# Altium schematic symbol library UCP.SchLib: 378 symbols (part 7 of 14)
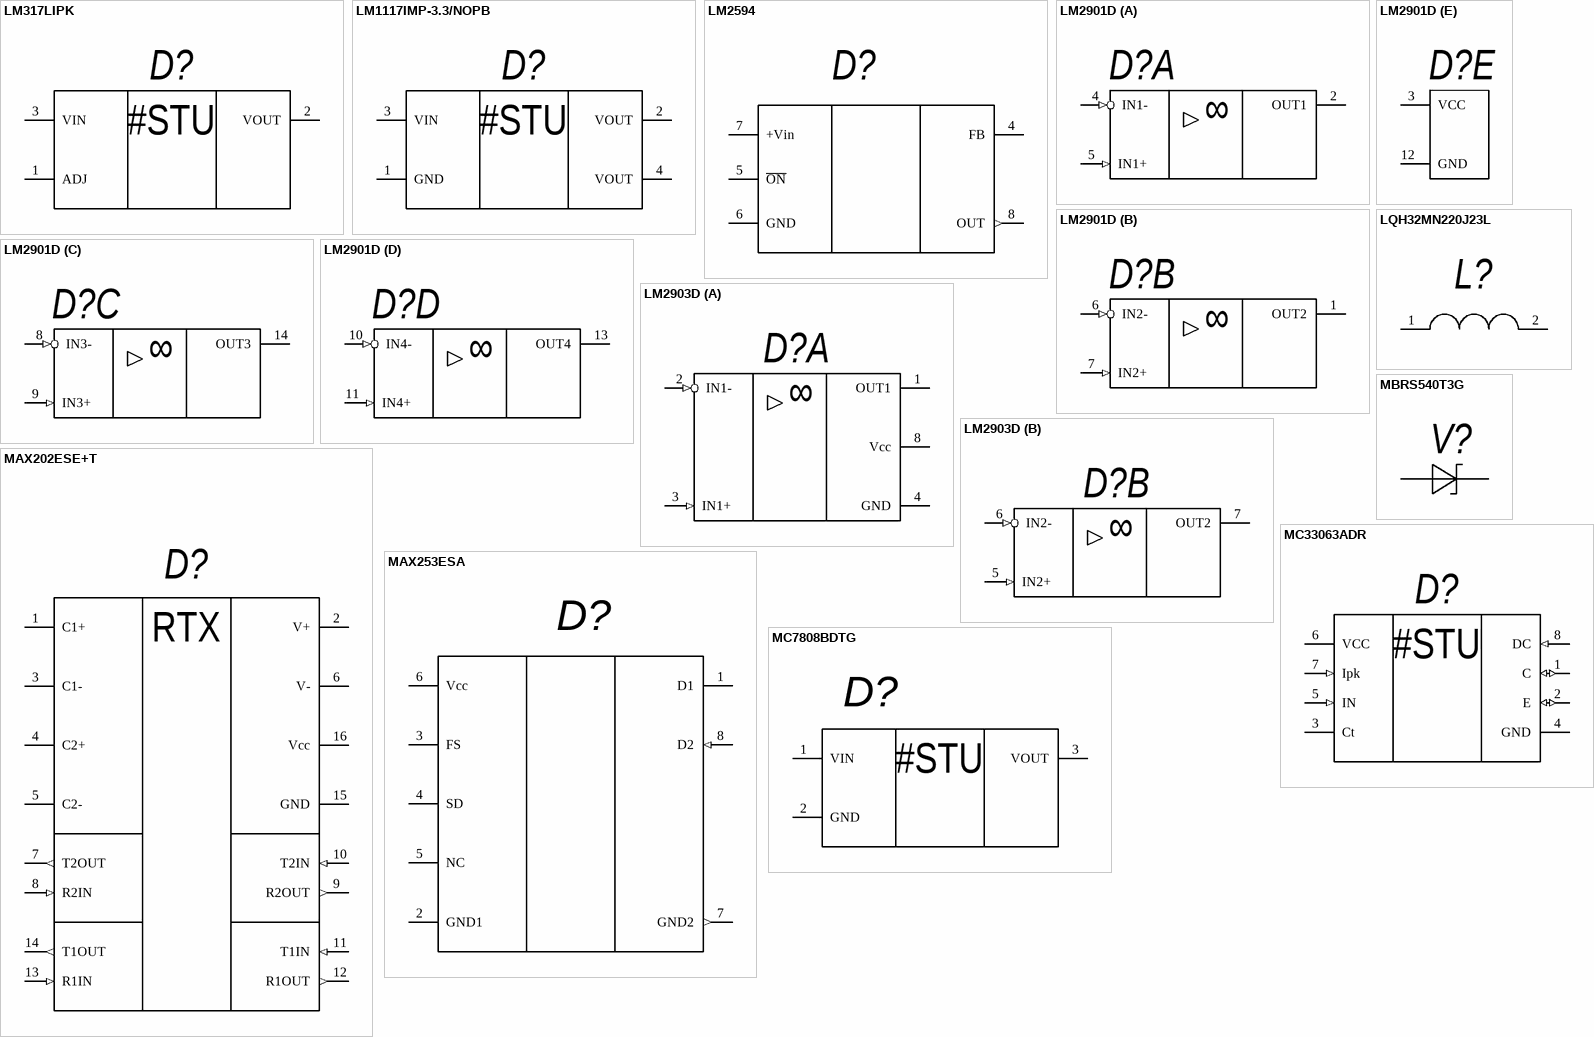
[diagram p30: symbols LM317LIPK to MC33063ADR]

## MC33063ADR
designator D?  (value not drawn)
1.5-A Peak Boost/Buck/Inverting Switching Regulators; Type: Микросхема; Supplier 1: Digi-Key; Supplier Part Number 1: 296-17763-1-ND; Case/Package: SOIC-8-150; Mount: SMT; Value: MC33063
footprint SOIC8P127_490X600X175L83X42N (Small Outline IC (SOIC), 1.27 mm pitch; 8 pin, 4.905 mm L X 3.90 mm W X 1.75 mm H body)
footprint SOIC8P127_490X600X175L65X42N (Small Outline IC (SOIC), 1.27 mm pitch; 8 pin, 4.905 mm L X 3.90 mm W X 1.75 mm H body)
pins: 1 C (io) "Коллектор ключа", 2 E (io) "Эмиттер ключа", 3 Ct "Времязадающий конденсатор", 4 GND (power), 5 IN (in) "Инвертирующий вход компаратора", 6 VCC (power) "Vcc", 7 Ipk (in) "Вход датчика тока", 8 DC (in) "Коллектор транзистора Дарлингтона"
text: #STU

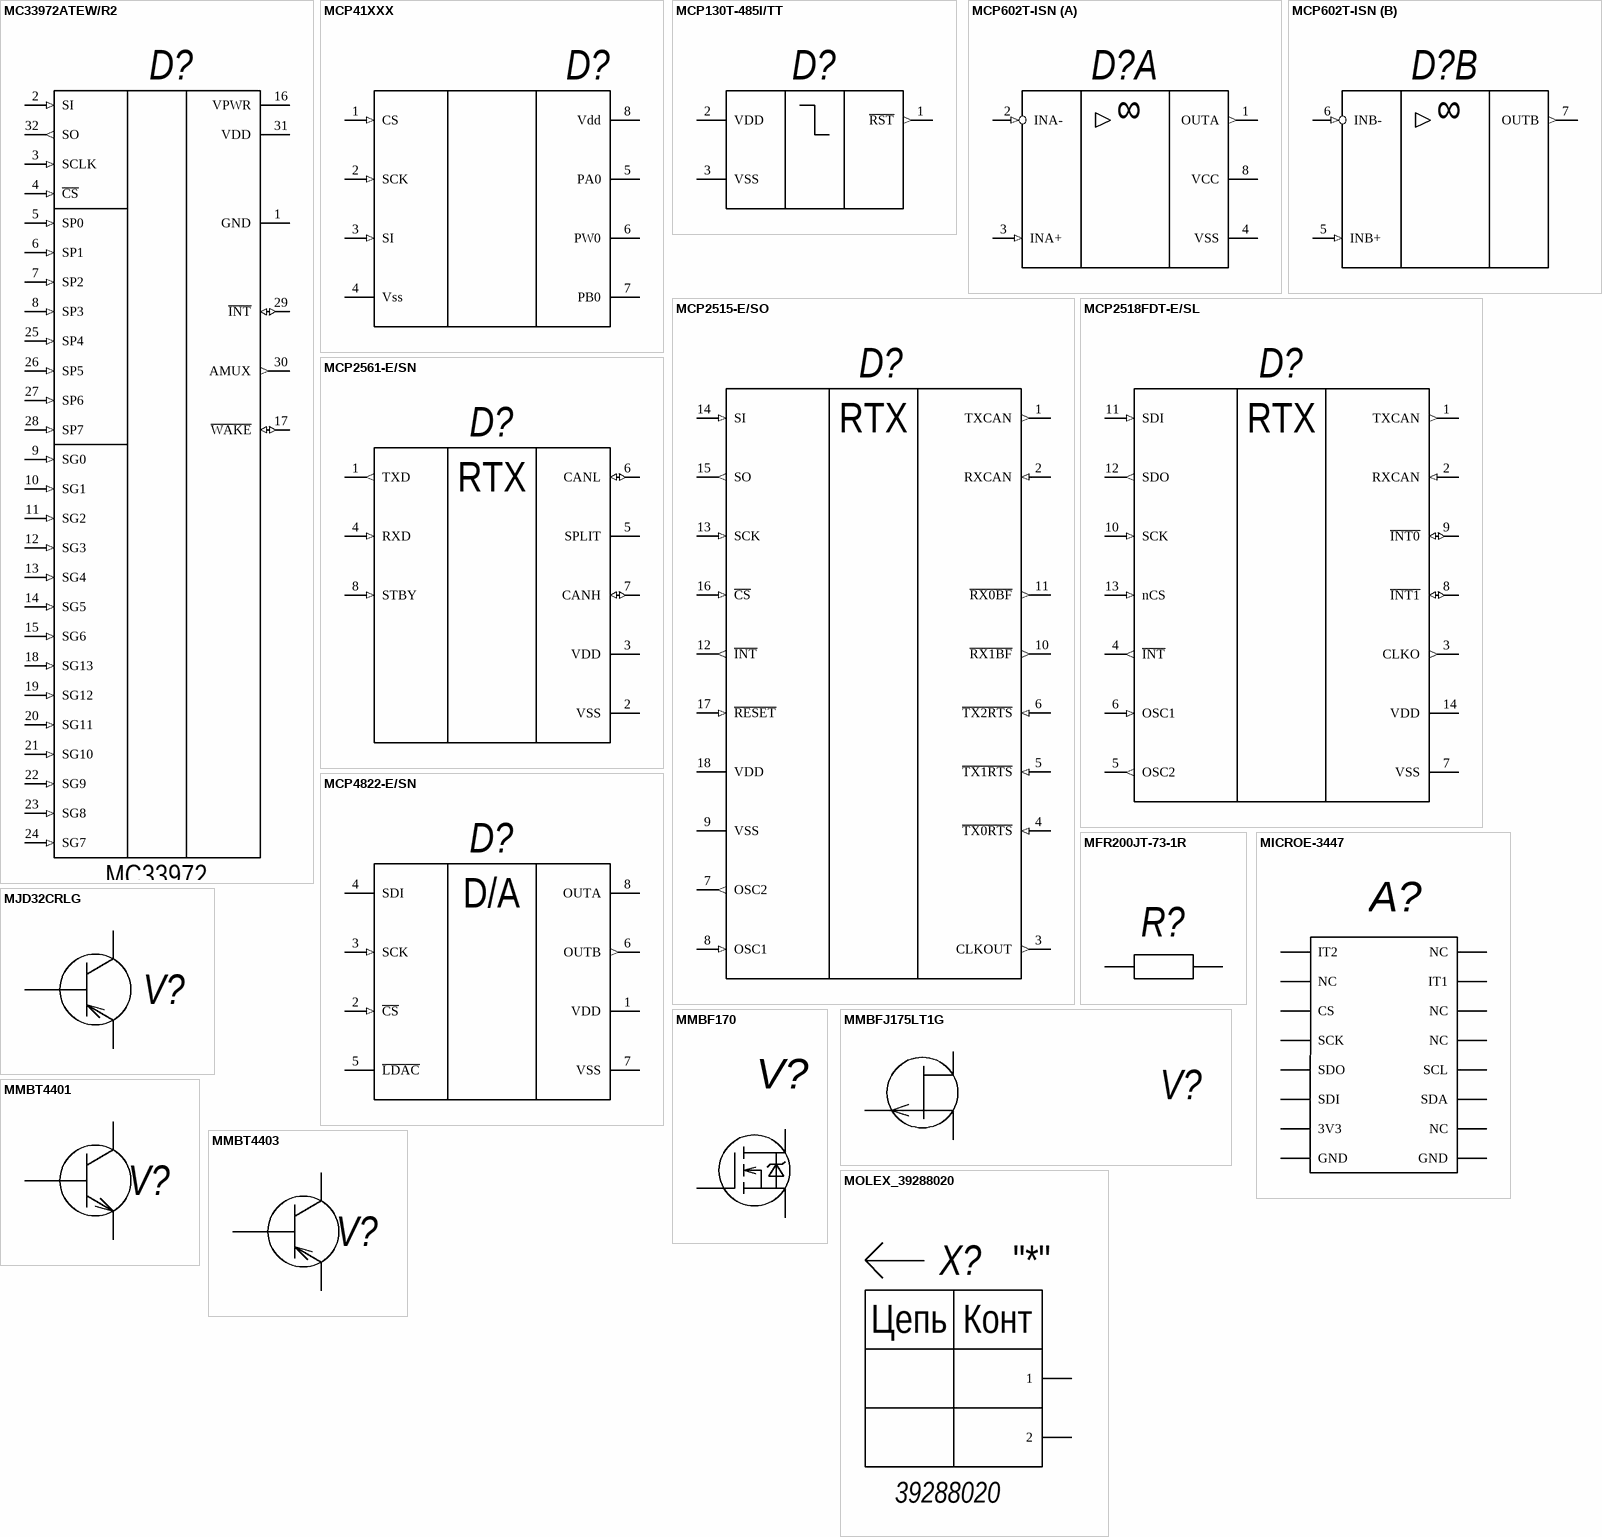
[diagram p16: symbols MC33972ATEW/R2 to MOLEX_39288020]

## MC33972ATEW/R2
designator D?  value MC33972  (hidden comment: MC33972ATEW/R2)
Multiple Switch Detection Interface with Suppressed Wake-Up Automotive 32-Pin SOIC W T/R; Manufacturer 1: NXP Freescale; Manufacturer Part Number 1: MC33972ATEWR2; Interface: SPI,Serial; Nominal Supply Current: 2mA; Operating Supply Voltage: 26V; Type: Микросхема; RoHS 1: Yes; Category: Interface ICs; Stock 1: 1020; Pricing 1: 1=5,83830, 10=5,24550, 25=4,95890, 100=4,29770, 250=4,07730, 500=3,65850, 1000=3,48430 (USD); Mount: SMT; Case/Package: SOP-32; Number of Pins: 32; Weight: 0.01799oz; Contact Plating: Tin,Matte; Min Operating Temperature: -40°C; Max Operating Temperature: 125°C; Packaging: Tape and Reel; Package Quantity: 1000; Series: -; Supply Current: 2mA; Radiation Hardening: No; Lead Free: Lead Free; Halogen Free: Halogen Free; RoHS Compliant: Yes; ComponentLink1URL: https://datasheet.ciiva.com/15134/getdatasheetpartid-342878-15134783.pdf?src-supplier=Verical; ComponentLink1Description: https://datasheet.ciiva.com/15134/getdatasheetpartid-342878-15134783.pdf?src-supplier=Verical; ComponentLink2URL: https://datasheet.ciiva.com/8128/mc33972-8128875.pdf?src-supplier=Avnet; ComponentLink2Description: https://datasheet.ciiva.com/8128/mc33972-8128875.pdf?src-supplier=Avnet; ComponentLink3URL: https://datasheet.ciiva.com/16446/mc33972-16446155.pdf?src-supplier=Future+Electronics; ComponentLink3Description: https://datasheet.ciiva.com/16446/mc33972-16446155.pdf?src-supplier=Future+Electronics; ComponentLink4URL: https://datasheet.ciiva.com/6632/mc33972-6632319.pdf?src-supplier=Digi-Key; ComponentLink4Description: https://datasheet.ciiva.com/6632/mc33972-6632319.pdf?src-supplier=Digi-Key; Supplier 1: Arrow Electronics; Supplier Part Number 1: MC33972ATEWR2; Supplier 2: Farnell; Supplier Part Number 2: 2776211
footprint SOP32P65_1100X1030X265L70X30 (Small Outline Pkg (SOP), 0.65 mm pitch; 32 pin, 11.00 mm L X 7.50 mm W X 2.65 mm H body)
pins: 1 GND (power) "Ground", 2 SI (in) "SPI control data input pin from the MCU to the 33972", 3 SCLK (in) "SPI control clock input pin", 4 ~{CS} (in) "SPI control chip select input pin from the MCU to the 33972. Logic [0} allows data to be transferred in", 5 SP0 (in) "Programmable switch-to-battery or switch-to-ground input pins.", 6 SP1 (in) "Programmable switch-to-battery or switch-to-ground input pins.", 7 SP2 (in) "Programmable switch-to-battery or switch-to-ground input pins.", 8 SP3 (in) "Programmable switch-to-battery or switch-to-ground input pins.", 9 SG0 (in) "Switch-to-ground input pins", 10 SG1 (in) "Switch-to-ground input pins", 11 SG2 (in) "Switch-to-ground input pins", 12 SG3 (in) "Switch-to-ground input pins", 13 SG4 (in) "Switch-to-ground input pins", 14 SG5 (in) "Switch-to-ground input pins", 15 SG6 (in) "Switch-to-ground input pins", 16 VPWR (power) "Battery supply input pin. Pin requires external reverse battery protection.", 17 ~{WAKE} (io) "Open drain wake-up output. Designed to control a power supply enable pin.", 18 SG13 (in) "Switch-to-ground input pins", 19 SG12 (in) "Switch-to-ground input pins", 20 SG11 (in) "Switch-to-ground input pins", 21 SG10 (in) "Switch-to-ground input pins", 22 SG9 (in) "Switch-to-ground input pins", 23 SG8 (in) "Switch-to-ground input pins", 24 SG7 (in) "Switch-to-ground input pins", 25 SP4 (in) "Programmable switch-to-battery or switch-to-ground input pins.", 26 SP5 (in) "Programmable switch-to-battery or switch-to-ground input pins.", 27 SP6 (in) "Programmable switch-to-battery or switch-to-ground input pins.", 28 SP7 (in) "Programmable switch-to-battery or switch-to-ground input pins.", 29 ~{INT} (io) "Open-drain output to MCU. Used to indicate an input switch change of state.", 30 AMUX (out) "Analog multiplex output", 31 VDD (power) "3.3 / 5.0 V supply. Sets SPI communication level for the SO driver.", 32 SO (out) "Provides digital data from the 33972 to the MCU"

## MCP41XXX
designator D?  (value not drawn)
Single/Dual Digital Potentiometer with SPI™ Interface; Type: Микросхема; Value: MCP41; Supplier 1: Digi-Key; Supplier Part Number 1: MCP41010-I/SN-ND; Case/Package: SOIC-8-150; Mount: SMT
footprint SOIC8P127_490X600X175L65X42N (Small Outline IC (SOIC), 1.27 mm pitch; 8 pin, 4.905 mm L X 3.90 mm W X 1.75 mm H body)
footprint SOIC8P127_490X600X175L65X42N (Small Outline IC (SOIC), 1.27 mm pitch; 8 pin, 4.905 mm L X 3.90 mm W X 1.75 mm H body)
pins: 1 CS (in) "Serial Data Input", 2 SCK (in) "Serial Clock Input", 3 SI (in) "Chip Select Input", 4 Vss (power) "Synchronization Input.  This pin is used to transfer DAC settings (Input Registers) to the output registers (VOUT)", 5 PA0 "Ground reference point for all circuitry on the device", 6 PW0 "Supply Voltage Input (2.7V to 5.5V)", 7 PB0 "DACB Output", 8 Vdd (power) "DACA Output"

## MCP130T-485I/TT
designator D?  (value not drawn)
Power Supply Support Circuit, Fixed, 1 Channel, +4.73V, CMOS, PDSO3; Manufacturer 1: Microchip; Max Supply Voltage: 5.5V; Min Supply Voltage: 1V; Type: Микросхема; Nominal Supply Current: 60uA; Number of Voltages Monitored: 1; Reset: Active Low; Reset Timeout: 150ms; Threshold Voltage: 4.725V; Overvoltage Threshold: 4.85V; Undervoltage Threshold: 4.6V; Watchdog Timer: No; Quiescent Current: 45uA; Value: MCP130; Supplier 1: Digi-Key; Manufacturer Part Number 1: MCP130T-485I/TT; RoHS: Yes; Category: Voltage Supervisors; Stock 1: 334; Pricing 1: 1=0,55000, 25=0,45600, 100=0,42400 (USD); Mount: SMT; Case/Package: SOT-23-3; Number of Pins: 3; Min Operating Temperature: -40°C; Max Operating Temperature: 85°C; Packaging: Tape and Reel; Package Quantity: 3000; Operating Supply Current: 60uA; Max Supply Current: 60uA; Number of Elements: 1; Min Reset Threshold Voltage: 4.6V; Max Reset Threshold Voltage: 4.85V; Supply Current: 60uA; Length: 3.04mm; Width: 1.4mm; Height: 1.02mm; Radiation Hardening: No; REACH SVHC: No SVHC; Lead Free: Lead Free; RoHS Compliant: Yes; ComponentLink1URL: https://datasheet.ciiva.com/1969/11184d-1969586.pdf?src-supplier=Digi-Key; ComponentLink1Description: https://datasheet.ciiva.com/1969/11184d-1969586.pdf?src-supplier=Digi-Key; ComponentLink2URL: https://datasheet.ciiva.com/1969/11184d-1969587.pdf?src-supplier=Digi-Key; ComponentLink2Description: https://datasheet.ciiva.com/1969/11184d-1969587.pdf?src-supplier=Digi-Key; ComponentLink3URL: https://datasheet.ciiva.com/1969/11184d-1969588.pdf?src-supplier=Digi-Key; ComponentLink3Description: https://datasheet.ciiva.com/1969/11184d-1969588.pdf?src-supplier=Digi-Key; ComponentLink4URL: https://datasheet.ciiva.com/8140/11184d-8140437.pdf?src-supplier=Avnet; ComponentLink4Description: https://datasheet.ciiva.com/8140/11184d-8140437.pdf?src-supplier=Avnet; ComponentLink5URL: https://datasheet.ciiva.com/5696/11184d-5696166.pdf?src-supplier=Farnell; ComponentLink5Description: https://datasheet.ciiva.com/5696/11184d-5696166.pdf?src-supplier=Farnell; ComponentLink6URL: https://datasheet.ciiva.com/7990/11603-7990633.pdf?src-supplier=Element14; ComponentLink6Description: https://datasheet.ciiva.com/7990/11603-7990633.pdf?src-supplier=Element14; ComponentLink7URL: https://datasheet.ciiva.com/16357/11184d-16357833.pdf?src-supplier=Future+Electronics; ComponentLink7Description: https://datasheet.ciiva.com/16357/11184d-16357833.pdf?src-supplier=Future+Electronics; Supplier Part Number 1: MCP130T-485I/TTCT-ND
footprint SOT23-3P95_240X110L25X60N (Small Outline Transistor (SOT23), 0.95 mm pitch; 3 pin, 2.90 mm L X 1.30 mm W X 1.10 mm H body)
footprint SOT23-3P95_240X110L30X43N (Small Outline Transistor (SOT23), 0.95 mm pitch; 3 pin, 2.90 mm L X 1.30 mm W X 1.10 mm H body)
pins: 1 ~{RST} (out) "Назначение вывода", 2 VDD (power) "Power", 3 VSS (power) "GND"

## MCP602T-ISN
designator D?  (value not drawn)
MCP602 Series 6 V 2.8 MHz Single Supply CMOS Operational Amplifier - SOIC-8; Manufacturer 1: Microchip; Manufacturer Part Number 1: MCP602T-I/SN; Bandwidth: 2.8MHz; Slew Rate: 2.3V/µs; Common Mode Rejection Ratio: 75dB; Max Supply Voltage: 6V; Min Supply Voltage: 2.7V; Number of Channels: 2; Output Current: 22mA; Nominal Supply Current: 230uA; Voltage Gain: 115dB; Operating Supply Voltage: 5.5V; Input Bias Current: 1pA; Input Offset Voltage (Vos): 2mV; Power Supply Rejection Ratio (PSRR): 80dB; Number of Amplifiers: 1; Max Frequency: 1kHz; Amplifier Type: GENERAL PURPOSE; Input Offset Voltage-Max: 3mV; Type: Микросхема; Supplier 1: Digi-Key; Supplier Part Number 1: MCP602T-I/SNCT-ND; RoHS: Yes; Category: Amplifiers - Op Amps, Buffer, Instrumentation; Stock 1: 420; Pricing 1: 1=0,68000, 25=0,57240, 100=0,52500 (USD); Mount: SMT; Case/Package: SOIC-8-150; Number of Pins: 8; Min Operating Temperature: -40°C; Max Operating Temperature: 85°C; Unity Gain Bandwidth Product: 2.8MHz; Packaging: Tape and Reel; Package Quantity: 3300; Number of Circuits: 2; Gain Bandwidth Product: 2.8MHz; Operating Supply Current: 230uA; Output Current per Channel: 22mA; Number of Elements: 2; Series: -; Supply Current: 230uA; Technology: CMOS; Length: 4.9mm; Width: 3.9mm; Height: 1.5mm; Radiation Hardening: No; REACH SVHC: No SVHC; Lead Free: Lead Free; RoHS Compliant: Yes; ComponentLink1URL: https://datasheet.ciiva.com/1804/21314g-1804930.pdf?src-supplier=Digi-Key; ComponentLink1Description: https://datasheet.ciiva.com/1804/21314g-1804930.pdf?src-supplier=Digi-Key; ComponentLink2URL: https://datasheet.ciiva.com/16387/filehandler-aspxddocname-en011761-16387224.pdf?src-supplier=Future+Electronics; ComponentLink2Description: https://datasheet.ciiva.com/16387/filehandler-aspxddocname-en011761-16387224.pdf?src-supplier=Future+Electronics; ComponentLink3URL: https://datasheet.ciiva.com/11711/21314g-11711097.pdf?src-supplier=Avnet; ComponentLink3Description: https://datasheet.ciiva.com/11711/21314g-11711097.pdf?src-supplier=Avnet; ComponentLink4URL: https://datasheet.ciiva.com/8079/77774-8079114.pdf?src-supplier=Element14; ComponentLink4Description: https://datasheet.ciiva.com/8079/77774-8079114.pdf?src-supplier=Element14; Description 1: MCP602 Series 6 V 2.8 MHz Single Supply CMOS Operational Amplifier - SOIC-8; Value: MCP602
footprint SOIC8P127_490X600X175L83X42N (Small Outline IC (SOIC), 1.27 mm pitch; 8 pin, 4.905 mm L X 3.90 mm W X 1.75 mm H body)
footprint SOIC8P127_490X600X175L65X42N (Small Outline IC (SOIC), 1.27 mm pitch; 8 pin, 4.905 mm L X 3.90 mm W X 1.75 mm H body)
part A pins: 1 OUTA (out) "Analog Output (op amp A)", 2 INA- (in) "Inverting Input (op amp A)", 3 INA+ (in) "Non-inverting Input (op amp A)", 4 VSS (power) "Negative Power Supply", 8 VCC (power) "Positive Power Supply"
part B pins: 5 INB+ (in) "Non-inverting Input (op amp B)", 6 INB- (in) "Inverting Input (op amp B)", 7 OUTB (out) "Analog Output (op amp B)"
part A text: ∞
part B text: ∞

## MCP2515-E/SO
designator D?  (value not drawn)
Stand-Alone CAN Controller with SPI Interface; Type: Микросхема; Value: 2515; Supplier 1: Digi-Key; Supplier 2: Digi-Key; Supplier Part Number 1: MCP2515-E/SO-ND; Supplier Part Number 2: MCP2515-I/SO-ND; Case/Package: SOIC-18; Mount: SMT
footprint SOIC18P127_1155X1030X265L83X41N (Small Outline IC (SOIC), 1.27 mm pitch; 18 pin, 11.55 mm L X 7.50 mm W X 2.65 mm H body)
pins: 1 TXCAN (out) "Transmit output pin to CAN bus", 2 RXCAN (in) "Receive input pin from CAN bus", 3 CLKOUT (out) "Clock output pin with programmable prescaler", 4 ~{TX0RTS} (in) "Transmit buffer TXB0 Request-to-Send", 5 ~{TX1RTS} (in) "Transmit buffer TXB1 Request-to-Send", 6 ~{TX2RTS} (in) "Transmit buffer TXB2 Request-to-Send", 7 OSC2 (out) "Oscillator output", 8 OSC1 (in) "Oscillator input", 9 VSS (power) "Ground reference for logic and I/O pins", 10 ~{RX1BF} (out) "Receive buffer RXB1 interrupt pin or general purpose digital output", 11 ~{RX0BF} (out) "Receive buffer RXB0 interrupt pin or general purpose digital output", 12 ~{INT} (out) "Interrupt output pin", 13 SCK (in) "Clock input pin for SPI interface", 14 SI (in) "Data input pin for SPI interface", 15 SO (out) "Data output pin for SPI interface", 16 ~{CS} (in) "Chip select input pin for SPI interface", 17 ~{RESET} (in) "Active-low device Reset input", 18 VDD (power) "Positive supply for logic and I/O pins"
text: RTX

## MCP2518FDT-E/SL
designator D?  (value not drawn)
External CAN FD Controller with SPI Interface; Type: Микросхема; Value: 2518; Supplier 1: Newark; Supplier Part Number 1: 07AH6109; Case/Package: SOIC-14; Mount: SMT
footprint SOIC14P127_865X600X175L83X42N (Small Outline IC (SOIC), 1.27 mm pitch; 14 pin, 8.65 mm L X 3.90 mm W X 1.75 mm H body)
footprint SOIC14P127_865X600X175L65X42N (Small Outline IC (SOIC), 1.27 mm pitch; 14 pin, 8.65 mm L X 3.90 mm W X 1.75 mm H body)
pins: 1 TXCAN (out) "Transmit output to CAN FD transceiver", 2 RXCAN (in) "Receive input from CAN FD transceiver", 3 CLKO (out) "Clock output/Start of Frame output", 4 ~{INT} (out) "Interrupt output (active low)", 5 OSC2 (out) "External oscillator output", 6 OSC1 (in) "External oscillator input", 7 VSS (power) "Ground", 8 ~{INT1} (io) "RX Interrupt output (active low)/GPIO", 9 ~{INT0} (io) "TX Interrupt output (active low)/GPIO/Transceiver Standby output", 10 SCK (in) "SPI clock input", 11 SDI (in) "SPI data input", 12 SDO (out) "SPI data output", 13 nCS (in) "SPI chip select input", 14 VDD (power) "Positive Supply"
text: RTX

## MCP2561-E/SN
designator D?  (value not drawn)
High-Speed CAN Transceiver; Type: Микросхема; Supplier 1: Newark; Supplier 2: Digi-Key; Supplier 3: Digi-Key; Supplier 4: Avnet; Supplier Part Number 1: 12X8698; Supplier Part Number 2: MCP2561T-E/SNCT-ND; Supplier Part Number 3: MCP2561-H/SN-ND; Supplier Part Number 4: MCP2561T-H/SN; Case/Package: SOIC-8-150; Mount: SMT; Value: MCP2561
footprint SOIC8P127_490X600X175L83X42N (Small Outline IC (SOIC), 1.27 mm pitch; 8 pin, 4.905 mm L X 3.90 mm W X 1.75 mm H body)
footprint SOIC8P127_490X600X175L65X42N (Small Outline IC (SOIC), 1.27 mm pitch; 8 pin, 4.905 mm L X 3.90 mm W X 1.75 mm H body)
pins: 1 TXD (out) "Transmit Data Input", 2 VSS (power) "Ground", 3 VDD (power) "Supply Voltage", 4 RXD (in) "Receive Data Output", 5 SPLIT "Common Mode Stabilization", 6 CANL (io) "CAN Low-Level Voltage I/O", 7 CANH (io) "CAN High-Level Voltage I/O", 8 STBY (in) "Standby Mode Input"
text: RTX

## MCP4822-E/SN
designator D?  (value not drawn)
DAC 2-CH Resistor-String 12-bit 8-pin SOIC; Manufacturer 1: Microchip; Description 1: DAC 2-CH Resistor-String 12-bit Automotive 8-Pin SOIC N Tube; Interface: SPI,Serial; Number of Channels: 2; Operating Supply Voltage: 5V; Min Supply Voltage: 2.7V; Max Supply Voltage: 5.5V; Settling Time: 4.5us; Number of Bits: 12; Resolution: 12b; Polarity: Bipolar,Unipolar; Supply Type: Single; Integral Nonlinearity (INL): 12LSB; Input Offset Voltage (Vos): 820uV; Nominal Supply Current: 415uA; Output Type: Voltage; Type: Микросхема; Supplier 1: Digi-Key; Supplier Part Number 1: MCP4822-E/SN-ND; Manufacturer Part Number 1: MCP4822-E/SN; RoHS: Yes; Category: Digital to Analog Converters (DACs); Stock 1: 1796; Pricing 1: 1=3,64000, 25=3,04240, 100=2,74540 (USD); Mount: SMT; Case/Package: SOIC-8-150; Number of Pins: 8; Min Operating Temperature: -40°C; Max Operating Temperature: 125°C; Packaging: Rail/Tube; Number of DAC Channels: 2; Package Quantity: 100; Number of Converters: 2; Length: 0.192inch; Width: 0.154inch; Height: 0.049inch; Radiation Hardening: No; REACH SVHC: No SVHC; Lead Free: Lead Free; ComponentLink1URL: https://datasheet.ciiva.com/3040/22249a-3040592.pdf?src-supplier=Avnet; ComponentLink1Description: https://datasheet.ciiva.com/3040/22249a-3040592.pdf?src-supplier=Avnet; ComponentLink2URL: https://datasheet.ciiva.com/26922/getdatasheetpartid-768931-26922605.pdf?src-supplier=Verical; ComponentLink2Description: https://datasheet.ciiva.com/26922/getdatasheetpartid-768931-26922605.pdf?src-supplier=Verical; ComponentLink3URL: https://datasheet.ciiva.com/7660/630374-7660760.pdf?src-supplier=Element14; ComponentLink3Description: https://datasheet.ciiva.com/7660/630374-7660760.pdf?src-supplier=Element14; ComponentLink4URL: https://datasheet.ciiva.com/16606/22249a-16606904.pdf?src-supplier=Avnet+Europe; ComponentLink4Description: https://datasheet.ciiva.com/16606/22249a-16606904.pdf?src-supplier=Avnet+Europe; Value: MCP4822
footprint SOIC8P127_490X600X175L83X42N (Small Outline IC (SOIC), 1.27 mm pitch; 8 pin, 4.905 mm L X 3.90 mm W X 1.75 mm H body)
footprint SOIC8P127_490X600X175L65X42N (Small Outline IC (SOIC), 1.27 mm pitch; 8 pin, 4.905 mm L X 3.90 mm W X 1.75 mm H body)
pins: 1 VDD (power) "Supply Voltage Input (2.7V to 5.5V)", 2 ~{CS} (in) "Chip Select Input", 3 SCK (in) "Serial Clock Input", 4 SDI "Serial Data Input", 5 ~{LDAC} "Synchronization Input.  This pin is used to transfer DAC settings (Input Registers) to the output registers (VOUT)", 6 OUTB (out) "DACB Output", 7 VSS (power) "Ground reference point for all circuitry on the device", 8 OUTA "DACA Output"
text: D/A

## MFR200JT-73-1R
designator R?  (value not drawn)
Resistor Axial 2W 1 Ом; Value: 1; Supplier 1: Digi-Key; Supplier Part Number 1: RSMF2JA1R00-ND; Case/Package: DIP-2; Mount: THT; Type: Резистор
footprint RESAV375W80L1650D550
pins: 1, 2

## MICROE-3447
designator A?  (value not drawn)
Mikroe MIKROE-3447 6DOF IMU 8 Click is an advanced 6-axis motion tracking board that uses the ISM330DLC high-performance System in Package (SiP). The SIP is equipped with a 3-axis gyroscope and a 3-axis accelerometer. This combination allows for full 6D sensing and is tailored toward Industry 4.0. The ISM330DLC is equipped with many smart features used to optimize firmware and power consumption. These features include a powerful interrupt engine capable of detecting several different events. Also included are 4K of FIFO buffer, configurable signal processing, and support for both I2C and SPI communication interfaces.; Value: 3447; Case/Package: DIP-16; Mount: THT; Type: Модуль электронный
footprint MICROE-3447
pins: P1.1 IT2 "Назначение вывода", P1.2 NC "Назначение вывода", P1.3 CS "Назначение вывода", P1.4 SCK "Назначение вывода", P1.5 SDO "Назначение вывода", P1.6 SDI "Назначение вывода", P1.7 3V3 "Назначение вывода", P1.8 GND "Назначение вывода", P2.1 NC "Назначение вывода", P2.2 IT1 "Назначение вывода", P2.3 NC "Назначение вывода", P2.4 NC "Назначение вывода", P2.5 SCL "Назначение вывода", P2.6 SDA "Назначение вывода", P2.7 NC "Назначение вывода", P2.8 GND "Назначение вывода"

## MJD32CRLG
designator V?  (value not drawn)
Transistor PNP; Value: MJD32; Supplier 1: Digi-Key; Supplier Part Number 1: MJD32CRLGOSCT-ND; Case/Package: TO-252-3; Mount: SMT; Type: Транзистор
footprint DPAK4P229_990X238L159X76T520X546N (DPAK, 2.29 mm pitch; 2 pin, 6.095 mm L X 6.54 mm W X 2.38 mm H body)
pins: 1 B, 3 E, 4 C

## MMBF170
designator V?  (value not drawn)
N-Channel 60 V 5 Ohm Enhancement Mode Field Effect Transistor - SOT-23; Manufacturer 1: ON Semiconductor / Fairchild; Continuous Drain Current (ID): 500mA; Gate to Source Voltage (Vgs): 20V; Rds On Max: 5R; Input Capacitance: 40pF; Max Power Dissipation: 300mW; Drain to Source Voltage (Vdss): 60V; Element Configuration: Single; Turn-Off Delay Time: 10ns; Number of Elements: 1; Nominal Vgs: 2.1V; Supplier 1: Avnet; Manufacturer Part Number 1: MMBF170; RoHS: Yes; Category: MOSFETs; Stock 1: 1957571; Pricing 1: 7103=0,05210, 7200=0,05069, 15000=0,04928, 36000=0,04787, 72000=0,04646, 360000=0,04506, 720000=0,04365, 3000=0,05025, 6000=0,04891, 12000=0,04757, 18000=0,04623, 24000=0,04489 (USD); Mount: SMT; Case/Package: SOT-23-3; Number of Pins: 3; Contact Plating: Tin,Matte; Weight: 0.03g; Min Operating Temperature: -55°C; Max Operating Temperature: 150°C; Packaging: Tape and Reel; Package Quantity: 1; Drain to Source Breakdown Voltage: 60V; Power Dissipation: 300mW; Drain to Source Resistance: 5R; Voltage Rating (DC): 60V; Current Rating: 500mA; Turn-On Delay Time: 10ns; Threshold Voltage: 2.1V; On-State Resistance: 5R; Dual Supply Voltage: 60V; Termination: SMD/SMT; Length: 2.92mm; Width: 3.05mm; Height: 0.93mm; Radiation Hardening: No; RoHS Compliant: Yes; Lead Free: Lead Free; REACH SVHC: No SVHC; ComponentLink1URL: https://datasheet.ciiva.com/34301/991692-34301843.pdf?src-supplier=Jameco; ComponentLink1Description: https://datasheet.ciiva.com/34301/991692-34301843.pdf?src-supplier=Jameco; ComponentLink2URL: https://datasheet.ciiva.com/15137/getdatasheetpartid-53269-15137203.pdf?src-supplier=Verical; ComponentLink2Description: https://datasheet.ciiva.com/15137/getdatasheetpartid-53269-15137203.pdf?src-supplier=Verical; ComponentLink3URL: https://datasheet.ciiva.com/931/mmbf170-931792.pdf?src-supplier=Digi-Key; ComponentLink3Description: https://datasheet.ciiva.com/931/mmbf170-931792.pdf?src-supplier=Digi-Key; ComponentLink4URL: https://datasheet.ciiva.com/28548/694801-28548205.pdf?src-supplier=Element14; ComponentLink4Description: https://datasheet.ciiva.com/28548/694801-28548205.pdf?src-supplier=Element14; ComponentLink5URL: https://datasheet.ciiva.com/46382/694801-46382955.pdf?src-supplier=Element14; ComponentLink5Description: https://datasheet.ciiva.com/46382/694801-46382955.pdf?src-supplier=Element14; ComponentLink6URL: https://datasheet.ciiva.com/22681/694801-22681799.pdf?src-supplier=Element14; ComponentLink6Description: https://datasheet.ciiva.com/22681/694801-22681799.pdf?src-supplier=Element14; ComponentLink7URL: https://datasheet.ciiva.com/22681/694801-22681797.pdf?src-supplier=Element14; ComponentLink7Description: https://datasheet.ciiva.com/22681/694801-22681797.pdf?src-supplier=Element14; ComponentLink8URL: https://datasheet.ciiva.com/22681/694801-22681798.pdf?src-supplier=Element14; ComponentLink8Description: https://datasheet.ciiva.com/22681/694801-22681798.pdf?src-supplier=Element14; ComponentLink9URL: https://datasheet.ciiva.com/11175/mmbf170-11175212.pdf?src-supplier=Avnet; ComponentLink9Description: https://datasheet.ciiva.com/11175/mmbf170-11175212.pdf?src-supplier=Avnet; ComponentLink10URL: https://datasheet.ciiva.com/8114/mmbf170-8114701.pdf?src-supplier=Avnet; ComponentLink10Description: https://datasheet.ciiva.com/8114/mmbf170-8114701.pdf?src-supplier=Avnet; ComponentLink11URL: https://datasheet.ciiva.com/931/mmbf170-931793.pdf?src-supplier=Digi-Key; ComponentLink11Description: https://datasheet.ciiva.com/931/mmbf170-931793.pdf?src-supplier=Digi-Key; ComponentLink12URL: https://datasheet.ciiva.com/931/bs170-931791.pdf?src-supplier=Digi-Key; ComponentLink12Description: https://datasheet.ciiva.com/931/bs170-931791.pdf?src-supplier=Digi-Key; Type: Транзистор; Value: MMBF170
footprint SOT23-3P95_240X110L25X60N (Small Outline Transistor (SOT23), 0.95 mm pitch; 3 pin, 2.90 mm L X 1.30 mm W X 1.10 mm H body)
footprint SOT23-3P95_240X110L30X43N (Small Outline Transistor (SOT23), 0.95 mm pitch; 3 pin, 2.90 mm L X 1.30 mm W X 1.10 mm H body)
pins: 1 G, 2 S, 3 D

## MMBFJ175LT1G
designator V?  (value not drawn)
JFET, 30V, 0.6A, 0.225W, SOT-23-3; Breakdown Voltage Vbr:30V; Zero Gate Voltage Drain Current Idss Min:7mA; Zero Gate Voltage Drain Current Idss Max:60mA; Gate-Source Cutoff Voltage Vgs(off) Max:6V; Transistor Type:JFET ;RoHS Compliant: Yes; Manufacturer 1: ON Semiconductor; Voltage Rating (DC): -25V; Max Power Dissipation: 225mW; Polarity: P-CHANNEL; Input Capacitance: 11pF; Gate to Source Voltage (Vgs): 25V; Continuous Drain Current (ID): -1nA; Element Configuration: Single; Current Rating: -60mA; Drain to Source Resistance: 125R; Polarization: P; Supplier 1: RSComponents; Manufacturer Part Number 1: MMBFJ175LT1G; RoHS: Yes; Category: JFETs; Stock 1: 1; Pricing 1: 25=0,49300, 100=0,28300, 250=0,26300, 500=0,24400, 1000=0,20700 (USD); Case/Package: SOT-23-3; Number of Pins: 3; Weight: 0.050717oz; Contact Plating: Tin,Matte; Min Operating Temperature: -55°C; Max Operating Temperature: 150°C; Package Quantity: 1; Packaging: Tape and Reel; Series: MMBFJ175L; Drain to Source Voltage (Vdss): 25V; Power Dissipation: 225mW; Breakdown Voltage: 30V; On-State Resistance: 125R; Length: 3.04mm; Width: 1.4mm; Height: 1.01mm; Radiation Hardening: No; Lead Free: Lead Free; RoHS Compliant: Yes; REACH SVHC: No SVHC; Halogen Free: Halogen Free; ComponentLink1URL: https://datasheet.ciiva.com/961/mmbfj175lt1-d-961141.pdf?src-supplier=Avnet; ComponentLink1Description: https://datasheet.ciiva.com/961/mmbfj175lt1-d-961141.pdf?src-supplier=Avnet; ComponentLink2URL: https://datasheet.ciiva.com/961/mmbfj175lt1-d-961141.pdf?src-supplier=Digi-Key; ComponentLink2Description: https://datasheet.ciiva.com/961/mmbfj175lt1-d-961141.pdf?src-supplier=Digi-Key; ComponentLink3URL: https://datasheet.ciiva.com/15137/getdatasheetpartid-38495-15137953.pdf?src-supplier=Verical; ComponentLink3Description: https://datasheet.ciiva.com/15137/getdatasheetpartid-38495-15137953.pdf?src-supplier=Verical; ComponentLink4URL: https://datasheet.ciiva.com/961/mmbfj175lt1-d-961142.pdf?src-supplier=Digi-Key; ComponentLink4Description: https://datasheet.ciiva.com/961/mmbfj175lt1-d-961142.pdf?src-supplier=Digi-Key; ComponentLink5URL: https://datasheet.ciiva.com/16369/mmbfj175lt1-d-16369846.pdf?src-supplier=Future+Electronics; ComponentLink5Description: https://datasheet.ciiva.com/16369/mmbfj175lt1-d-16369846.pdf?src-supplier=Future+Electronics; ComponentLink6URL: https://datasheet.ciiva.com/25899/mmbfj175lt1-d-25899638.pdf?src-supplier=Avnet+Europe; ComponentLink6Description: https://datasheet.ciiva.com/25899/mmbfj175lt1-d-25899638.pdf?src-supplier=Avnet+Europe; ComponentLink7URL: https://datasheet.ciiva.com/961/mmbfj175lt1-d-961143.pdf?src-supplier=Digi-Key; ComponentLink7Description: https://datasheet.ciiva.com/961/mmbfj175lt1-d-961143.pdf?src-supplier=Digi-Key; Supplier Part Number 1: 8647840; Mount: SMT; Type: Транзистор; Value: MMBFJ175
footprint SOT23-3P95_240X110L25X60N (Small Outline Transistor (SOT23), 0.95 mm pitch; 3 pin, 2.90 mm L X 1.30 mm W X 1.10 mm H body)
footprint SOT23-3P95_240X110L30X43N (Small Outline Transistor (SOT23), 0.95 mm pitch; 3 pin, 2.90 mm L X 1.30 mm W X 1.10 mm H body)
pins: 1 D, 2 S, 3 G

## MMBT4401
designator V?  (value not drawn)
NPN Ic=600mA Vceo=40V hfe=100~300 fT=250MHz P=310mW SOT-23; Manufacturer 1: Diodes; Manufacturer Part Number 1: MMBT4401-7-F; Value: 4401; Max Power Dissipation: 300mW; Collector Emitter Voltage (VCEO): 40V; Max Collector Current: 600mA; Collector Base Voltage (VCBO): 60V; Emitter Base Voltage (VEBO): 6V; Element Configuration: Single; Gain Bandwidth Product: 250MHz; hFE Min: 100; Power Dissipation: 310mW; Collector-emitter Voltage-Max: 750mV; Number of Elements: 1; ComponentLink1URL: https://assets.nexperia.com/documents/data-sheet/BCP56_BCX56_BC56PA.pdf?src-supplier=Digi-Key; ComponentLink1Description: https://assets.nexperia.com/documents/data-sheet/BCP56_BCX56_BC56PA.pdf?src-supplier=Digi-Key; Case/Package: SOT-23-3; Mount: SMT; Type: Транзистор; Supplier 1: Farnell; Supplier Part Number 1: 2061459; RoHS 1: Yes; Category: BJTs; Stock 1: 42810; Pricing 1: 5=0,15400, 10=0,14600, 100=0,07920, 500=0,04950 (EUR); Number of Pins: 3; Weight: 0.000282oz; Contact Plating: Tin,Matte; Min Operating Temperature: -55°C; Max Operating Temperature: 150°C; Packaging: Tape and Reel; Polarity: NPN; Collector Emitter Breakdown Voltage: 40V; Package Quantity: 3000; Voltage Rating (DC): 40V; Transition Frequency: 250MHz; Series: Automotive, AEC-Q101; Frequency: 250MHz; Collector Emitter Saturation Voltage: 750mV; Max Breakdown Voltage: 40V; Max Frequency: 250MHz; Continuous Collector Current: 600mA; Length: 3.05mm; Width: 1.4mm; Height: 1mm; Radiation Hardening: No; Lead Free: Lead Free; RoHS Compliant: Yes; Reach SVHC Compliant: Yes; ComponentLink2URL: https://datasheet.ciiva.com/15139/getdatasheetpartid-91436-15139165.pdf?src-supplier=Verical; ComponentLink2Description: https://datasheet.ciiva.com/15139/getdatasheetpartid-91436-15139165.pdf?src-supplier=Verical; ComponentLink3URL: https://datasheet.ciiva.com/11201/ds30039-11201820.pdf?src-supplier=Avnet; ComponentLink3Description: https://datasheet.ciiva.com/11201/ds30039-11201820.pdf?src-supplier=Avnet; ComponentLink4URL: https://datasheet.ciiva.com/16199/ds30039-16199054.pdf?src-supplier=Future+Electronics; ComponentLink4Description: https://datasheet.ciiva.com/16199/ds30039-16199054.pdf?src-supplier=Future+Electronics; ComponentLink5URL: https://datasheet.ciiva.com/972/ds30039-972548.pdf?src-supplier=Digi-Key; ComponentLink5Description: https://datasheet.ciiva.com/972/ds30039-972548.pdf?src-supplier=Digi-Key; ComponentLink6URL: https://datasheet.ciiva.com/972/ds30039-972549.pdf?src-supplier=Digi-Key; ComponentLink6Description: https://datasheet.ciiva.com/972/ds30039-972549.pdf?src-supplier=Digi-Key; ComponentLink7URL: https://datasheet.ciiva.com/972/ds30039-972547.pdf?src-supplier=Digi-Key; ComponentLink7Description: https://datasheet.ciiva.com/972/ds30039-972547.pdf?src-supplier=Digi-Key
footprint SOT23-3P95_240X110L30X43N (Small Outline Transistor (SOT23), 0.95 mm pitch; 3 pin, 2.90 mm L X 1.30 mm W X 1.10 mm H body)
footprint SOT23-3P95_240X110L25X60N (Small Outline Transistor (SOT23), 0.95 mm pitch; 3 pin, 2.90 mm L X 1.30 mm W X 1.10 mm H body)
pins: 1 B, 2 E, 3 C

## MMBT4403
designator V?  (value not drawn)
PNP General-Purpose Amplifier; Manufacturer 1: Nexperia USA; Manufacturer Part Number 1: BC856B,215; RoHS: No; Category: BJTs; Stock 1: 11364; Pricing 1: 1=0,13000, 10=0,11000, 50=0,11000, 100=0,06000, 500=0,03900, 1000=0,02700, 3000=0,02100, 10000=0,02100 (USD); ComponentLink1URL: https://assets.nexperia.com/documents/data-sheet/BC856_BC857_BC858.pdf?src-supplier=Digi-Key; ComponentLink1Description: https://assets.nexperia.com/documents/data-sheet/BC856_BC857_BC858.pdf?src-supplier=Digi-Key; Supplier 1: RSComponents; Supplier Part Number 1: 5450387; Case/Package: SOT-23-3; Mount: SMT; Type: Транзистор; Value: MMBT4403
footprint SOT23-3P95_240X110L25X60N (Small Outline Transistor (SOT23), 0.95 mm pitch; 3 pin, 2.90 mm L X 1.30 mm W X 1.10 mm H body)
footprint SOT23-3P95_240X110L30X43N (Small Outline Transistor (SOT23), 0.95 mm pitch; 3 pin, 2.90 mm L X 1.30 mm W X 1.10 mm H body)
pins: 1 B, 2 E, 3 C

## MOLEX_39288020
designator X?, comment 39288020  Marck-2: "*"
Connector Header 2 Position Solder Straight Thru-Hole 2 Terminal 1 Port Mini-Fit Jr™; Manufacturer 1: Molex; Current Rating: 9A; Number of Poles: 2; Voltage Rating: 600V; Gender: Male; Insulation Resistance: 1GR; Contact Resistance: 10mR; Test Voltage: 1.5kV; Number of Ports: 1; Pitch: 4.2mm; Row Spacing: 0.165inch; Glow Wire Compliant: Non-compliant; Marck-1: *; Supplier 1: RSComponents; Supplier Part Number 1: 6705423; Supplier 2: Avnet; Supplier Part Number 2: 0039288020; Supplier 3: Arrow Electronics; Supplier Part Number 3: 39-28-8020; Manufacturer Part Number 1: 39-28-8020; RoHS: Yes; Category: Headers and Wire Housings; Stock 1: 400; Pricing 1: 5=0,42700, 50=0,36200, 100=0,32200, 250=0,27800, 1000=0,25700 (USD); Mount: THT; Contact Plating: Tin,Copper; Contact Material: Brass; Housing Material: Nylon; Housing Color: Natural; Material: Nylon; Min Operating Temperature: -40°C; Max Operating Temperature: 105°C; Termination: Solder; Number of Rows: 2; Packaging: Tray; Package Quantity: 1200; Max Voltage Rating (DC): 600V; Number of Positions: 2; Max Voltage Rating (AC): 600V; Orientation: Straight; Voltage Rating (DC): 600V; Fastening Type: Ramp; Series: Mini-Fit® Jr™ 5566; Contact Gender: Male; Number of Contacts: 2; Number of Circuits: 2; Number of Lines: 2; Contact Type: Male Pin; Length: 5.8mm; Height: 12.8mm; Depth: 11mm; Radiation Hardening: No; RoHS Compliant: Yes; Flammability Rating: UL94 V-0; Lead Free: Lead Free; REACH SVHC: Unknown; Halogen Free: Low Halogen; ComponentLink1URL: https://datasheet.ciiva.com/26916/getdatasheetpartid-299935-26916618.pdf?src-supplier=Verical; ComponentLink1Description: https://datasheet.ciiva.com/26916/getdatasheetpartid-299935-26916618.pdf?src-supplier=Verical; ComponentLink2URL: https://datasheet.ciiva.com/1442/65385-1442787.pdf?src-supplier=Element14; ComponentLink2Description: https://datasheet.ciiva.com/1442/65385-1442787.pdf?src-supplier=Element14; ComponentLink3URL: https://datasheet.ciiva.com/30207/32740039288020-pcb-headers-30207198.pdf?src-supplier=Onlinecomponents.com; ComponentLink3Description: https://datasheet.ciiva.com/30207/32740039288020-pcb-headers-30207198.pdf?src-supplier=Onlinecomponents.com; ComponentLink4URL: https://datasheet.ciiva.com/16656/0039288020-pcb-headers-16656369.pdf?src-supplier=Avnet+Europe; ComponentLink4Description: https://datasheet.ciiva.com/16656/0039288020-pcb-headers-16656369.pdf?src-supplier=Avnet+Europe; ComponentLink5URL: https://datasheet.ciiva.com/5155/0039288020-pcb-headers-228423-5155725.pdf?src-supplier=Mouser; ComponentLink5Description: https://datasheet.ciiva.com/5155/0039288020-pcb-headers-228423-5155725.pdf?src-supplier=Mouser; ComponentLink6URL: https://datasheet.ciiva.com/11746/0900766b80d5d4b6-11746399.pdf?src-supplier=RSComponents; ComponentLink6Description: https://datasheet.ciiva.com/11746/0900766b80d5d4b6-11746399.pdf?src-supplier=RSComponents; ComponentLink7URL: https://datasheet.ciiva.com/19462/881311-19462280.pdf?src-supplier=Jameco; ComponentLink7Description: https://datasheet.ciiva.com/19462/881311-19462280.pdf?src-supplier=Jameco; ComponentLink8URL: https://datasheet.ciiva.com/10090/0039288020-pcb-headers-10090363.pdf?src-supplier=Avnet; ComponentLink8Description: https://datasheet.ciiva.com/10090/0039288020-pcb-headers-10090363.pdf?src-supplier=Avnet; Case/Package: DIP-2; Type: Вилка; Value: 39288020
footprint MOLEX_39288020 (Header, Vertical Receptacle, 4.20 mm row X 5.50 mm column pitch; 1.19 mm lead width, 2 pins, 2 rows, 1 pin per row, 5.40 mm L X 9.60 mm W X 13.05 mm H body)
pins: 1, 2
text: Цепь; Конт

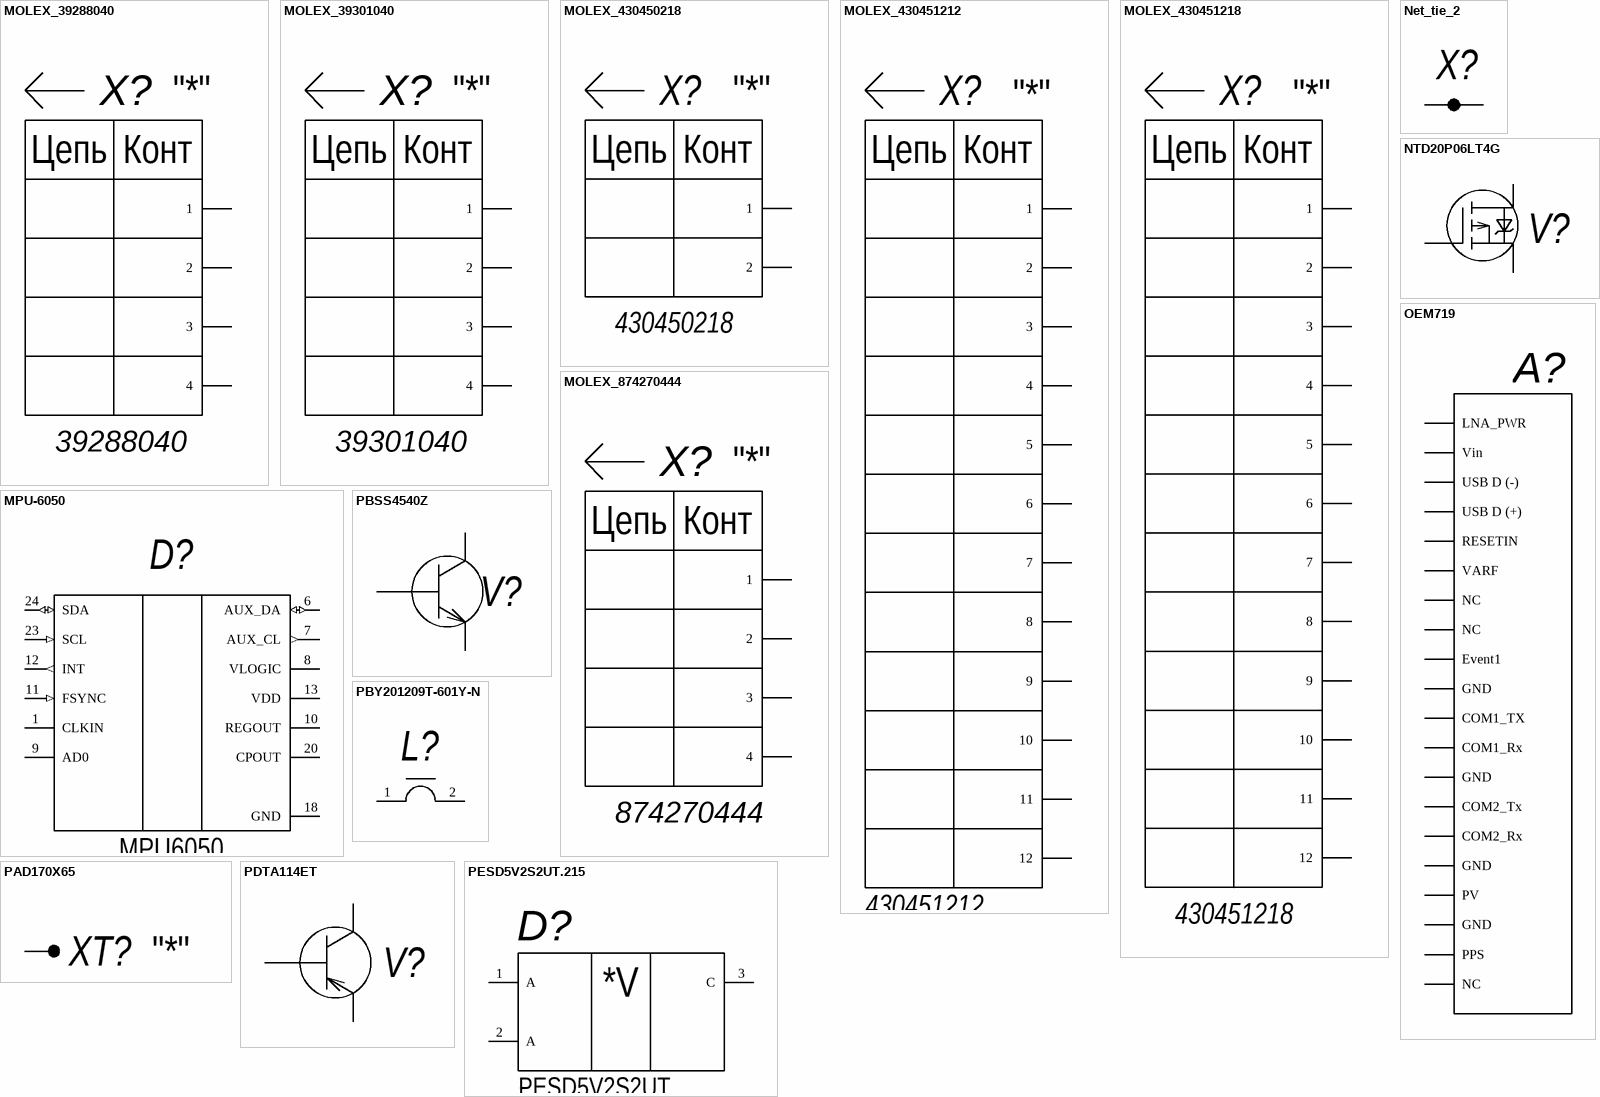
[diagram p17: symbols MOLEX_39288040 to PESD5V2S2UT.215]

## MOLEX_39288040
designator X?, comment 39288040  Marck-2: "*"
Header; Wire to Board; PCB Plug; 4 Cont; Thru-Hole; Mini-Fit Jr./5566 Series; Natural; Manufacturer 1: Molex; Voltage Rating: 600V; Insulation Resistance: 1GR; Max Voltage Rating (DC): 600.6kV; Current Rating: 9A; Mating Cycles: 30; Gender: Male; Contact Resistance: 10mR; Max Current Rating: 8A; Number of Positions: 4; Connector Type: Rectangular; Number of Ports: 1; Pitch: 4.2mm; Row Spacing: 0.165inch; Approvals: UL,CSA,TUV; Glow Wire Compliant: Non-compliant; Marck-1: *; Supplier 1: Digi-Key; Supplier Part Number 1: WM23801-ND; Manufacturer Part Number 1: 39-28-8040; RoHS: Yes; Category: Headers and Wire Housings; Stock 1: 2018; Pricing 1: 1=1,21000, 10=1,00200, 100=0,83480, 1000=0,66780, 5000=0,58432, 10000=0,55511 (USD); Mount: THT; Contact Plating: Tin,Copper; Contact Material: Brass; Housing Material: Nylon; Color: Natural; Material: Nylon; Housing Color: Natural; Min Operating Temperature: -40°C; Max Operating Temperature: 105°C; Termination: Solder; Orientation: Straight; Number of Rows: 2; Voltage Rating (AC): 600V; Contact Gender: Male; Packaging: Tray; Package Quantity: 700; Number of Contacts: 4; Max Voltage Rating (AC): 600V; Number of Circuits: 4; Voltage Rating (DC): 600V; Fastening Type: Ramp; Series: 5566; Contact Type: Male Pin; Length: 10mm; Width: 12.8mm; Height: 12.8mm; Lead Pitch: 4.2mm; Depth: 11mm; Radiation Hardening: No; Lead Free: Lead Free; REACH SVHC: Unknown; Halogen Free: Low Halogen; Flammability Rating: UL94 V-0; ComponentLink1URL: https://datasheet.ciiva.com/7843/1596928-7843938.pdf?src-supplier=Element14; ComponentLink1Description: https://datasheet.ciiva.com/7843/1596928-7843938.pdf?src-supplier=Element14; ComponentLink2URL: https://datasheet.ciiva.com/22683/1722365-22683427.pdf?src-supplier=Element14; ComponentLink2Description: https://datasheet.ciiva.com/22683/1722365-22683427.pdf?src-supplier=Element14; ComponentLink3URL: https://datasheet.ciiva.com/30131/73420039288040-pcb-headers-30131996.pdf?src-supplier=Onlinecomponents.com; ComponentLink3Description: https://datasheet.ciiva.com/30131/73420039288040-pcb-headers-30131996.pdf?src-supplier=Onlinecomponents.com; ComponentLink4URL: https://datasheet.ciiva.com/16654/0039288040-pcb-headers-16654999.pdf?src-supplier=Avnet+Europe; ComponentLink4Description: https://datasheet.ciiva.com/16654/0039288040-pcb-headers-16654999.pdf?src-supplier=Avnet+Europe; ComponentLink5URL: https://datasheet.ciiva.com/5147/0039288040-pcb-headers-228424-5147723.pdf?src-supplier=Mouser; ComponentLink5Description: https://datasheet.ciiva.com/5147/0039288040-pcb-headers-228424-5147723.pdf?src-supplier=Mouser; ComponentLink6URL: https://datasheet.ciiva.com/11746/0900766b80d882e8-11746219.pdf?src-supplier=RSComponents; ComponentLink6Description: https://datasheet.ciiva.com/11746/0900766b80d882e8-11746219.pdf?src-supplier=RSComponents; ComponentLink7URL: https://datasheet.ciiva.com/19461/881346-19461679.pdf?src-supplier=Jameco; ComponentLink7Description: https://datasheet.ciiva.com/19461/881346-19461679.pdf?src-supplier=Jameco; ComponentLink8URL: https://datasheet.ciiva.com/26916/getdatasheetpartid-149656-26916395.pdf?src-supplier=Verical; ComponentLink8Description: https://datasheet.ciiva.com/26916/getdatasheetpartid-149656-26916395.pdf?src-supplier=Verical; Case/Package: DIP-4; Type: Вилка; Value: 39288040
footprint MOLEX_39288040 (Header, Vertical Receptacle, 4.20 mm row X 5.50 mm column pitch; 1.19 mm lead width, 4 pins, 2 rows, 2 pins per row, 9.80 mm L X 9.60 mm W X 13.05 mm H body)
pins: 1, 2, 3, 4
text: Цепь; Конт

## MOLEX_39301040
designator X?, comment 39301040  Marck-2: "*"
Connector Wire to Board Header 4 Position 4.2mm Solder Right Angle Thru-Hole Tray; Manufacturer 1: Molex; Voltage Rating: 600V; Insulation Resistance: 1GR; Max Voltage Rating (DC): 600.6kV; Current Rating: 9A; Mating Cycles: 30; Gender: Male; Contact Resistance: 10mR; Max Current Rating: 8A; Number of Positions: 4; Connector Type: Rectangular; Number of Ports: 1; Row Spacing: 0.165inch; Approvals: UL,CSA,TUV; Glow Wire Compliant: Non-compliant; Marck-1: *; Supplier 1: Digi-Key; Supplier Part Number 1: WM23801-ND; Manufacturer Part Number 1: 39-28-8040; RoHS: Yes; Category: Headers and Wire Housings; Stock 1: 2018; Pricing 1: 1=1,21000, 10=1,00200, 100=0,83480, 1000=0,66780, 5000=0,58432, 10000=0,55511 (USD); Mount: THT; Contact Plating: Tin,Copper; Contact Material: Brass; Housing Material: Nylon; Color: Natural; Material: Nylon; Housing Color: Natural; Min Operating Temperature: -40°C; Max Operating Temperature: 105°C; Termination: Solder; Orientation: Straight; Number of Rows: 2; Voltage Rating (AC): 600V; Contact Gender: Male; Packaging: Tray; Package Quantity: 700; Number of Contacts: 4; Max Voltage Rating (AC): 600V; Number of Circuits: 4; Voltage Rating (DC): 600V; Fastening Type: Ramp; Series: 5566; Contact Type: Male Pin; Length: 10mm; Width: 12.8mm; Height: 12.8mm; Pitch: 4.2mm; Lead Pitch: 4.2mm; Depth: 11mm; Radiation Hardening: No; Lead Free: Lead Free; REACH SVHC: Unknown; Halogen Free: Low Halogen; Flammability Rating: UL94 V-0; ComponentLink1URL: https://datasheet.ciiva.com/7843/1596928-7843938.pdf?src-supplier=Element14; ComponentLink1Description: https://datasheet.ciiva.com/7843/1596928-7843938.pdf?src-supplier=Element14; ComponentLink2URL: https://datasheet.ciiva.com/22683/1722365-22683427.pdf?src-supplier=Element14; ComponentLink2Description: https://datasheet.ciiva.com/22683/1722365-22683427.pdf?src-supplier=Element14; ComponentLink3URL: https://datasheet.ciiva.com/30131/73420039288040-pcb-headers-30131996.pdf?src-supplier=Onlinecomponents.com; ComponentLink3Description: https://datasheet.ciiva.com/30131/73420039288040-pcb-headers-30131996.pdf?src-supplier=Onlinecomponents.com; ComponentLink4URL: https://datasheet.ciiva.com/16654/0039288040-pcb-headers-16654999.pdf?src-supplier=Avnet+Europe; ComponentLink4Description: https://datasheet.ciiva.com/16654/0039288040-pcb-headers-16654999.pdf?src-supplier=Avnet+Europe; ComponentLink5URL: https://datasheet.ciiva.com/5147/0039288040-pcb-headers-228424-5147723.pdf?src-supplier=Mouser; ComponentLink5Description: https://datasheet.ciiva.com/5147/0039288040-pcb-headers-228424-5147723.pdf?src-supplier=Mouser; ComponentLink6URL: https://datasheet.ciiva.com/11746/0900766b80d882e8-11746219.pdf?src-supplier=RSComponents; ComponentLink6Description: https://datasheet.ciiva.com/11746/0900766b80d882e8-11746219.pdf?src-supplier=RSComponents; ComponentLink7URL: https://datasheet.ciiva.com/19461/881346-19461679.pdf?src-supplier=Jameco; ComponentLink7Description: https://datasheet.ciiva.com/19461/881346-19461679.pdf?src-supplier=Jameco; ComponentLink8URL: https://datasheet.ciiva.com/26916/getdatasheetpartid-149656-26916395.pdf?src-supplier=Verical; ComponentLink8Description: https://datasheet.ciiva.com/26916/getdatasheetpartid-149656-26916395.pdf?src-supplier=Verical; Supplier 2: RSComponents; Supplier Part Number 2: 5109843; Manufacturer 2: Molex; Manufacturer Part Number 2: 39-30-1040; RoHS 2: Yes; Stock 2: 3850; Pricing 2: 5=0,81200, 100=0,62400, 375=0,59000, 1500=0,45000, 3000=0,42800 (GBP); Number of Poles: 4; Working Voltage: 600V; Reach SVHC Compliant: Yes; ELV: Compliant; RoHS Compliant: Yes; ComponentLink9URL: https://datasheet.ciiva.com/19461/1969163-19461149.pdf?src-supplier=Jameco; ComponentLink9Description: https://datasheet.ciiva.com/19461/1969163-19461149.pdf?src-supplier=Jameco; ComponentLink10URL: https://datasheet.ciiva.com/5162/0039301040-pcb-headers-160097-5162586.pdf?src-supplier=Mouser; ComponentLink10Description: https://datasheet.ciiva.com/5162/0039301040-pcb-headers-160097-5162586.pdf?src-supplier=Mouser; ComponentLink11URL: https://datasheet.ciiva.com/11748/0900766b805f2c40-11748053.pdf?src-supplier=RSComponents; ComponentLink11Description: https://datasheet.ciiva.com/11748/0900766b805f2c40-11748053.pdf?src-supplier=RSComponents; ComponentLink12URL: https://datasheet.ciiva.com/3935/240160039301040-pcb-headers-3935946.pdf?src-supplier=Arrow+Electronics; ComponentLink12Description: https://datasheet.ciiva.com/3935/240160039301040-pcb-headers-3935946.pdf?src-supplier=Arrow+Electronics; ComponentLink13URL: https://datasheet.ciiva.com/26921/getdatasheetpartid-176629-26921992.pdf?src-supplier=Verical; ComponentLink13Description: https://datasheet.ciiva.com/26921/getdatasheetpartid-176629-26921992.pdf?src-supplier=Verical; ComponentLink14URL: https://datasheet.ciiva.com/18454/70190747-18454021.pdf?src-supplier=Allied+Electronics; ComponentLink14Description: https://datasheet.ciiva.com/18454/70190747-18454021.pdf?src-supplier=Allied+Electronics; Case/Package: DIP-4 (+MECH-1); Type: Вилка; Value: 39301040
footprint MOLEX_39301040
pins: 1, 2, 3, 4
text: Цепь; Конт

## MOLEX_430450218
designator X?, comment 430450218  Marck-2: "*"
Header; Dual Row; Vertical; with Solder Tab; 2 Circuits; Tin Plate; Micro-Fit 3.; Manufacturer 1: Molex; Manufacturer Part Number 1: 43045-0218; Number of Contacts: 2; Contact Resistance: 10mR; Connector Type: Power,Rectangular; Gender: Male; Current Rating: 5A; Voltage Rating: 600V; Max Voltage Rating (DC): 250.25kV; Voltage Rating (DC): 250V; Mating Cycles: 30; Insulation Resistance: 1GR; Pitch: 3mm; Row Spacing: 0.118inch; Glow Wire Compliant: Compliant; Marck-1: *; Supplier 1: Digi-Key; Supplier Part Number 1: WM1801CT-ND; RoHS: Yes; Category: Headers and Wire Housings; Stock 1: 234; Pricing 1: 1=2,56000, 10=2,17800, 100=1,79930 (USD); Mount: SMT; Contact Plating: Tin; Contact Material: Brass,Tin; Color: Black; Housing Color: Black; Housing Material: Thermoplastic; Material: Polymer,Glass; Min Operating Temperature: -40°C; Max Operating Temperature: 105°C; Termination: Solder; Number of Rows: 2; Packaging: Tape and Reel; Orientation: Vertical; Series: Micro-Fit 3.0™ 43045; Package Quantity: 10; Fastening Type: Ramp; Number of Positions: 2; Contact Type: Male Pin; Contact Gender: Male; Number of Circuits: 2; Number of Poles: 2; Voltage Rating (AC): 250V; Working Voltage: 250V; Diameter: 3mm; Radiation Hardening: No; RoHS Compliant: Yes; Flammability Rating: UL94 V-0; REACH SVHC: Unknown; Halogen Free: Low Halogen; ComponentLink1URL: https://datasheet.ciiva.com/712/430451218-sd-712339.pdf?src-supplier=Digi-Key; ComponentLink1Description: https://datasheet.ciiva.com/712/430451218-sd-712339.pdf?src-supplier=Digi-Key; ComponentLink2URL: https://datasheet.ciiva.com/5157/0430450218-pcb-headers-142871-5157332.pdf?src-supplier=Mouser; ComponentLink2Description: https://datasheet.ciiva.com/5157/0430450218-pcb-headers-142871-5157332.pdf?src-supplier=Mouser; ComponentLink3URL: https://datasheet.ciiva.com/16725/0430450218-pcb-headers-16725477.pdf?src-supplier=Avnet+Europe; ComponentLink3Description: https://datasheet.ciiva.com/16725/0430450218-pcb-headers-16725477.pdf?src-supplier=Avnet+Europe; ComponentLink4URL: https://datasheet.ciiva.com/1489/1626453-1489078.pdf?src-supplier=Newark; ComponentLink4Description: https://datasheet.ciiva.com/1489/1626453-1489078.pdf?src-supplier=Newark; ComponentLink5URL: https://datasheet.ciiva.com/11747/0900766b80d6135b-11747607.pdf?src-supplier=RSComponents; ComponentLink5Description: https://datasheet.ciiva.com/11747/0900766b80d6135b-11747607.pdf?src-supplier=RSComponents; ComponentLink6URL: https://datasheet.ciiva.com/30236/176580430450218-pcb-headers-30236245.pdf?src-supplier=Onlinecomponents.com; ComponentLink6Description: https://datasheet.ciiva.com/30236/176580430450218-pcb-headers-30236245.pdf?src-supplier=Onlinecomponents.com; ComponentLink7URL: https://datasheet.ciiva.com/18454/70090792-18454650.pdf?src-supplier=Allied+Electronics; ComponentLink7Description: https://datasheet.ciiva.com/18454/70090792-18454650.pdf?src-supplier=Allied+Electronics; ComponentLink8URL: https://datasheet.ciiva.com/1443/1865007-1443442.pdf?src-supplier=Element14; ComponentLink8Description: https://datasheet.ciiva.com/1443/1865007-1443442.pdf?src-supplier=Element14; ComponentLink9URL: https://datasheet.ciiva.com/14155/04402320-14155215.pdf?src-supplier=Distrelec; ComponentLink9Description: https://datasheet.ciiva.com/14155/04402320-14155215.pdf?src-supplier=Distrelec; Case/Package: SMD-4; Type: Вилка; Value: 430450218
footprint MOLEX_430450218
pins: 1, 2
text: Цепь; Конт